# EAGLE library part DISP_TFT28_KD028QVFMA017 (library dp_devices.v6)
STARTEK KD028QVFMA017 2.8" TFT 240x320 RGB IPS
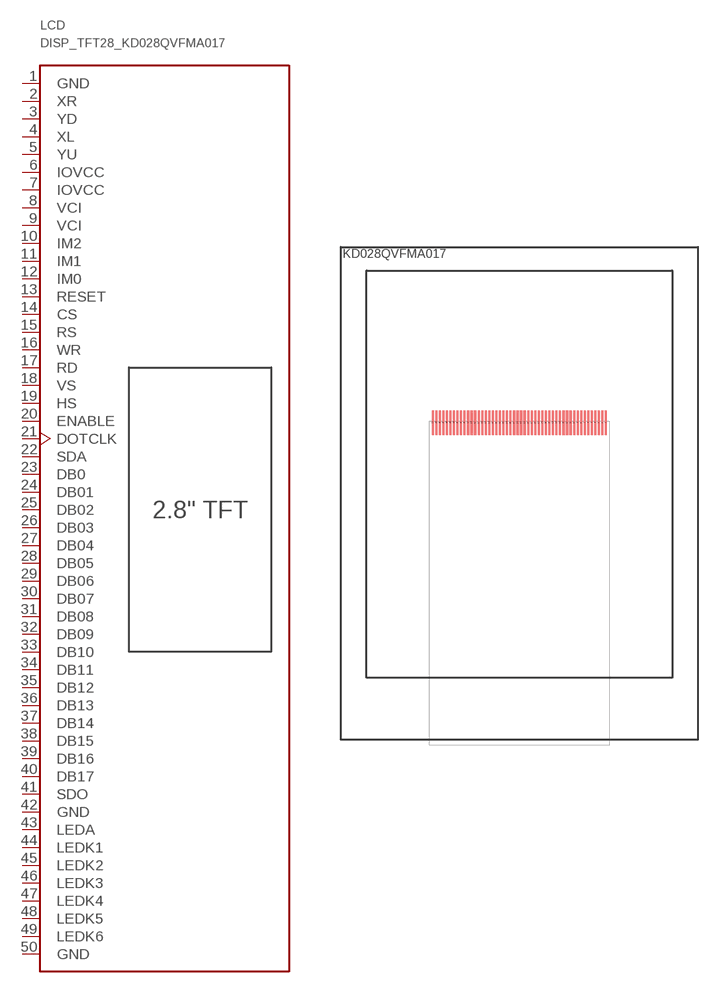
[diagram p217: symbol with the pads of KD028QVFMA017; footprint KD028QVFMA017]

Designator prefix LCD

## DISP_TFT28_KD028QVFMA017  [KD028QVFMA017]
1  GND  pwr
2  XR
3  YD
4  XL
5  YU
6  IOVCC  pwr
7  IOVCC  pwr
8  VCI  pwr
9  VCI  pwr
10  IM2  in
11  IM1  in
12  IM0  in
13  RESET  in
14  CS  in
15  RS
16  WR  in
17  RD  in
18  VS  in
19  HS  in
20  ENABLE  in
21  DOTCLK  in
22  SDA
23  DB0
24  DB01
25  DB02
26  DB03
27  DB04
28  DB05
29  DB06
30  DB07
31  DB08
32  DB09
33  DB10
34  DB11
35  DB12
36  DB13
37  DB14
38  DB15
39  DB16
40  DB17
41  SDO
42  GND  pwr
43  LEDA  pwr
44  LEDK1  pwr
45  LEDK2  pwr
46  LEDK3  pwr
47  LEDK4  pwr
48  LEDK5  pwr
49  LEDK6  pwr
50  GND  pwr

## Footprint KD028QVFMA017 (pad centres in mm)
2.8" STARTEK KD028QVFMA017
smd 0.3 x 3.5: 1 12.25,7.25; 2 11.75,7.25; 3 11.25,7.25; 4 10.75,7.25; 5 10.25,7.25; 6 9.75,7.25; 7 9.25,7.25; 8 8.75,7.25; 9 8.25,7.25; 10 7.75,7.25; 11 7.25,7.25; 12 6.75,7.25; 13 6.25,7.25; 14 5.75,7.25; 15 5.25,7.25; 16 4.75,7.25; 17 4.25,7.25; 18 3.75,7.25; 19 3.25,7.25; 20 2.75,7.25; 21 2.25,7.25; 22 1.75,7.25; 23 1.25,7.25; 24 0.75,7.25; 25 0.25,7.25; 26 -0.25,7.25; 27 -0.75,7.25; 28 -1.25,7.25; 29 -1.75,7.25; 30 -2.25,7.25; 31 -2.75,7.25; 32 -3.25,7.25; 33 -3.75,7.25; 34 -4.25,7.25; 35 -4.75,7.25; 36 -5.25,7.25; 37 -5.75,7.25; 38 -6.25,7.25; 39 -6.75,7.25; 40 -7.25,7.25; 41 -7.75,7.25; 42 -8.25,7.25; 43 -8.75,7.25; 44 -9.25,7.25; 45 -9.75,7.25; 46 -10.25,7.25; 47 -10.75,7.25; 48 -11.25,7.25; 49 -11.75,7.25; 50 -12.25,7.25